# Altium footprint library 2.00-SOP、SOIC封装.PcbLib: 70 footprints (part 5 of 5)
Each footprint in its own frame and in the unit in brackets; x right, y up, seen from the top. Pads: shape width x height; smd on the part's side, far side on the other; paste and mask are expansions set on the pad; w line width, h text height; cw(c..) or ccw(c..) is an arc to the next point about the centre after c.
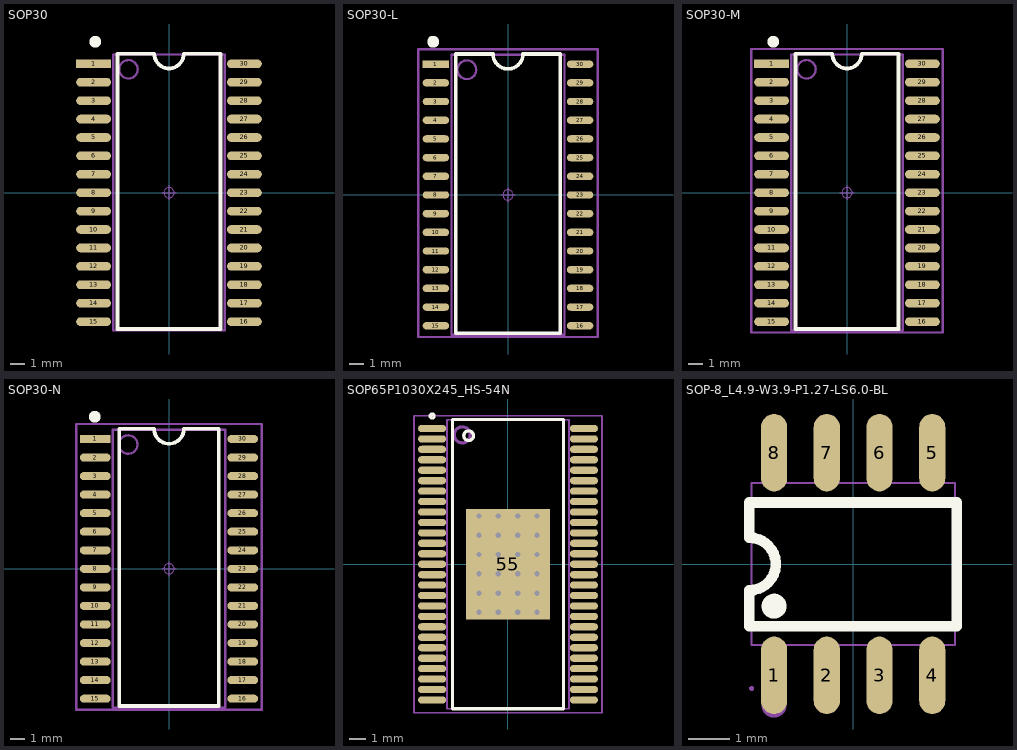
[diagram p4: the footprints below, top view; thin cyan lines are the x and y axes]

## SOP30 [mm] "淘宝ID:黄晶宝石"
pads (30):
  rect 2.4x0.6 smd: 1(-5.2,8.89)
  oval 2.4x0.6 smd: 2(-5.2,7.62) 3(-5.2,6.35) 4(-5.2,5.08) 5(-5.2,3.81) 6(-5.2,2.54) 7(-5.2,1.27) 8(-5.2,0) 9(-5.2,-1.27) 10(-5.2,-2.54) 11(-5.2,-3.81) 12(-5.2,-5.08) 13(-5.2,-6.35) 14(-5.2,-7.62) 15(-5.2,-8.89) 16(5.2,-8.89) 17(5.2,-7.62) 18(5.2,-6.35) 19(5.2,-5.08) 20(5.2,-3.81) 21(5.2,-2.54) 22(5.2,-1.27) 23(5.2,0) 24(5.2,1.27) 25(5.2,2.54) 26(5.2,3.81) 27(5.2,5.08) 28(5.2,6.35) 29(5.2,7.62) 30(5.2,8.89)
Top Overlay:
  circle w0.5: c-5.08,10.414 r0.155
  lines w0.254: -3.556,-9.398 3.556,-9.398 3.556,9.585 1.016,9.585 cw(c0,9.585) -1.016,9.585 -3.556,9.585 -3.556,-9.398
Mechanical 13:
  circle w0.15: c-2.794,8.509 r0.635
  lines w0.15: -3.85,-9.5 -3.85,9.525 3.85,9.525 3.85,-9.5 -3.85,-9.5
Mechanical 15:
  circle w0.05: c0,0 r0.35
  lines w0.05: -0.5,0 0.5,0 ; 0,-0.5 0,0.5
3D body "SOP30.STEP": height 2.7, standoff 0, extent -5.153,-9.5 5.153,9.5

## SOP30-L [mm] "19*10.3*2.6mm（长宽高）  淘宝ID:黄晶宝石"
pads (30):
  rect 1.8x0.5 smd: 1(-4.9,8.89)
  oval 1.8x0.5 smd: 2(-4.9,7.62) 3(-4.9,6.35) 4(-4.9,5.08) 5(-4.9,3.81) 6(-4.9,2.54) 7(-4.9,1.27) 8(-4.9,0) 9(-4.9,-1.27) 10(-4.9,-2.54) 11(-4.9,-3.81) 12(-4.9,-5.08) 13(-4.9,-6.35) 14(-4.9,-7.62) 15(-4.9,-8.89) 16(4.9,-8.89) 17(4.9,-7.62) 18(4.9,-6.35) 19(4.9,-5.08) 20(4.9,-3.81) 21(4.9,-2.54) 22(4.9,-1.27) 23(4.9,0) 24(4.9,1.27) 25(4.9,2.54) 26(4.9,3.81) 27(4.9,5.08) 28(4.9,6.35) 29(4.9,7.62) 30(4.9,8.89)
Top Overlay:
  circle w0.5: c-5.08,10.414 r0.155
  lines w0.254: -3.556,-9.398 3.556,-9.398 3.556,9.585 1.016,9.585 cw(c0,9.585) -1.016,9.585 -3.556,9.585 -3.556,-9.398
Mechanical 13:
  circle w0.15: c-2.794,8.509 r0.635
  lines w0.15: -3.85,-9.5 -3.85,9.525 3.85,9.525 3.85,-9.5 -3.85,-9.5
Mechanical 15:
  circle w0.05: c0,0 r0.35
  lines w0.05: -0.5,0 0.5,0 ; 0,-0.5 0,0.5
  lines w0.15: -6.096,-9.652 -6.096,9.906 6.096,9.906 6.096,-9.652 -6.096,-9.652
3D body "SOP30.STEP": height 2.7, standoff 0, extent -5.153,-9.5 5.153,9.5

## SOP30-M [mm] "19*10.3*2.6mm（长宽高）  封装库来自淘宝ID：黄晶宝石"
pads (30):
  rect 2.4x0.6 smd: 1(-5.2,8.89)
  oval 2.4x0.6 smd: 2(-5.2,7.62) 3(-5.2,6.35) 4(-5.2,5.08) 5(-5.2,3.81) 6(-5.2,2.54) 7(-5.2,1.27) 8(-5.2,0) 9(-5.2,-1.27) 10(-5.2,-2.54) 11(-5.2,-3.81) 12(-5.2,-5.08) 13(-5.2,-6.35) 14(-5.2,-7.62) 15(-5.2,-8.89) 16(5.2,-8.89) 17(5.2,-7.62) 18(5.2,-6.35) 19(5.2,-5.08) 20(5.2,-3.81) 21(5.2,-2.54) 22(5.2,-1.27) 23(5.2,0) 24(5.2,1.27) 25(5.2,2.54) 26(5.2,3.81) 27(5.2,5.08) 28(5.2,6.35) 29(5.2,7.62) 30(5.2,8.89)
Top Overlay:
  circle w0.5: c-5.08,10.414 r0.155
  lines w0.254: -3.556,-9.398 3.556,-9.398 3.556,9.585 1.016,9.585 cw(c0,9.585) -1.016,9.585 -3.556,9.585 -3.556,-9.398
Mechanical 13:
  circle w0.15: c-2.794,8.509 r0.635
  lines w0.15: -3.85,-9.5 -3.85,9.525 3.85,9.525 3.85,-9.5 -3.85,-9.5
Mechanical 15:
  circle w0.05: c0,0 r0.35
  lines w0.05: -0.5,0 0.5,0 ; 0,-0.5 0,0.5
  lines w0.15: -6.604,-9.652 6.604,-9.652 6.604,-8.89 6.604,9.906 -6.604,9.906 -6.604,-9.652
3D body "SOP30.STEP": height 2.7, standoff 0, extent -5.153,-9.5 5.153,9.5

## SOP30-N [mm] "19*10.3*2.6mm（长宽高） 封装库来自淘宝ID：黄晶宝石"
pads (30):
  rect 2.1x0.55 smd: 1(-5.05,8.89)
  oval 2.1x0.55 smd: 2(-5.05,7.62) 3(-5.05,6.35) 4(-5.05,5.08) 5(-5.05,3.81) 6(-5.05,2.54) 7(-5.05,1.27) 8(-5.05,0) 9(-5.05,-1.27) 10(-5.05,-2.54) 11(-5.05,-3.81) 12(-5.05,-5.08) 13(-5.05,-6.35) 14(-5.05,-7.62) 15(-5.05,-8.89) 16(5.05,-8.89) 17(5.05,-7.62) 18(5.05,-6.35) 19(5.05,-5.08) 20(5.05,-3.81) 21(5.05,-2.54) 22(5.05,-1.27) 23(5.05,0) 24(5.05,1.27) 25(5.05,2.54) 26(5.05,3.81) 27(5.05,5.08) 28(5.05,6.35) 29(5.05,7.62) 30(5.05,8.89)
Top Overlay:
  circle w0.5: c-5.08,10.414 r0.155
  lines w0.254: -3.4,-9.398 3.4,-9.398 3.4,9.585 1.016,9.585 cw(c0,9.585) -1.016,9.585 -3.4,9.585 -3.4,-9.398
Mechanical 13:
  circle w0.15: c-2.794,8.509 r0.635
  lines w0.15: -3.85,-9.5 3.85,-9.5 3.85,9.525 -3.85,9.525 -3.85,-9.5
Mechanical 15:
  circle w0.05: c0,0 r0.35
  lines w0.05: -0.5,0 0.5,0 ; 0,-0.5 0,0.5
  lines w0.15: -6.35,-9.652 -6.35,9.906 6.35,9.906 6.35,-9.652 -6.35,-9.652
3D body "SOP30.STEP": height 2.7, standoff 0, extent -5.153,-9.5 5.153,9.5

## SOP65P1030X245_HS-54N [mm] "SOP, 54-Leads, Body 18.0x7.6mm (max), Pitch 0.65mm, IPC Medium Density"
height 2.45
pads (55):
  oval 1.75x0.45 smd: 1(-4.725,8.45) 2(-4.725,7.8) 3(-4.725,7.15) 4(-4.725,6.5) 5(-4.725,5.85) 6(-4.725,5.2) 7(-4.725,4.55) 8(-4.725,3.9) 9(-4.725,3.25) 10(-4.725,2.6) 11(-4.725,1.95) 12(-4.725,1.3) 13(-4.725,0.65) 14(-4.725,0) 15(-4.725,-0.65) 16(-4.725,-1.3) 17(-4.725,-1.95) 18(-4.725,-2.6) 19(-4.725,-3.25) 20(-4.725,-3.9) 21(-4.725,-4.55) 22(-4.725,-5.2) 23(-4.725,-5.85) 24(-4.725,-6.5) 25(-4.725,-7.15) 26(-4.725,-7.8) 27(-4.725,-8.45) 28(4.725,-8.45) 29(4.725,-7.8) 30(4.725,-7.15) 31(4.725,-6.5) 32(4.725,-5.85) 33(4.725,-5.2) 34(4.725,-4.55) 35(4.725,-3.9) 36(4.725,-3.25) 37(4.725,-2.6) 38(4.725,-1.95) 39(4.725,-1.3) 40(4.725,-0.65) 41(4.725,0) 42(4.725,0.65) 43(4.725,1.3) 44(4.725,1.95) 45(4.725,2.6) 46(4.725,3.25) 47(4.725,3.9) 48(4.725,4.55) 49(4.725,5.2) 50(4.725,5.85) 51(4.725,6.5) 52(4.725,7.15) 53(4.725,7.8) 54(4.725,8.45)
  rect 5.2x6.9 smd: 55(0,0)
via 1.8,-3 diameter 0.66 hole 0.33
via 0.6,-3 diameter 0.66 hole 0.33
via -0.6,-3 diameter 0.66 hole 0.33
via -1.8,-3 diameter 0.66 hole 0.33
via 1.8,-1.8 diameter 0.66 hole 0.33
via 0.6,-1.8 diameter 0.66 hole 0.33
via -0.6,-1.8 diameter 0.66 hole 0.33
via -1.8,-1.8 diameter 0.66 hole 0.33
via 1.8,-0.6 diameter 0.66 hole 0.33
via 0.6,-0.6 diameter 0.66 hole 0.33
via -0.6,-0.6 diameter 0.66 hole 0.33
via -1.8,-0.6 diameter 0.66 hole 0.33
via 1.8,0.6 diameter 0.66 hole 0.33
via 0.6,0.6 diameter 0.66 hole 0.33
via -0.6,0.6 diameter 0.66 hole 0.33
via -1.8,0.6 diameter 0.66 hole 0.33
via 1.8,1.8 diameter 0.66 hole 0.33
via 0.6,1.8 diameter 0.66 hole 0.33
via -0.6,1.8 diameter 0.66 hole 0.33
via -1.8,1.8 diameter 0.66 hole 0.33
via 1.8,3 diameter 0.66 hole 0.33
via 0.6,3 diameter 0.66 hole 0.33
via -0.6,3 diameter 0.66 hole 0.33
via -1.8,3 diameter 0.66 hole 0.33
Top Overlay:
  circle w0.2: c-2.45,8 r0.3
  circle w0.2: c-4.725,9.225 r0.125
  lines w0.2: -3.45,-9 3.45,-9 3.45,9 -3.45,9 -3.45,-9
Mechanical 13:
  circle w0.2: c-2.85,8.05 r0.5
  lines w0.1: -3.8,-9 3.8,-9 3.8,9 -3.8,9 -3.8,-9
Mechanical 15:
  lines w0.1: -0.5,0 0.5,0 ; 0,-0.5 0,0.5 ; -5.85,-9.25 5.85,-9.25 5.85,9.25 -5.85,9.25 -5.85,-9.25
3D body: height 2.45, standoff 0.1, extent -3.8,-9 3.8,9

## SOP-8_L4.9-W3.9-P1.27-LS6.0-BL [mm]
pads (8):
  oval 0.63x1.865 smd: 1(-1.905,-2.682) 2(-0.635,-2.682) 3(0.635,-2.682) 4(1.905,-2.682) 5(1.905,2.682) 6(0.635,2.682) 7(-0.635,2.682) 8(-1.905,2.682)
Top Overlay:
  circle w0.3: c-1.905,-1.016 r0.15
  lines w0.254: -2.5,-1.498 2.5,-1.498 2.5,1.482 -2.5,1.482 -2.499,0.635 cw(c-2.5,0) -2.5,-0.635 -2.5,-1.498
Mechanical 6:
  circle w0.3: c-1.905,-3.4 r0.15
Mechanical 15:
  region: 2.115,-2.232 1.695,-2.232 1.695,-1.942 2.115,-1.942
  region: 0.845,-2.232 0.425,-2.232 0.425,-1.942 0.845,-1.942
  region: -0.425,-2.232 -0.845,-2.232 -0.845,-1.942 -0.425,-1.942
  region: -1.695,-2.232 -2.115,-2.232 -2.115,-1.942 -1.695,-1.942
  region: -2.115,2.232 -1.695,2.232 -1.695,1.942 -2.115,1.942
  region: -0.845,2.232 -0.425,2.232 -0.425,1.942 -0.845,1.942
  region: 0.425,2.232 0.845,2.232 0.845,1.942 0.425,1.942
  region: 1.695,2.232 2.115,2.232 2.115,1.942 1.695,1.942
  region: -2.115,-3 -2.115,-2.165 -1.695,-2.165 -1.695,-3
  region: -0.845,-3 -0.845,-2.165 -0.425,-2.165 -0.425,-3
  region: 0.425,-3 0.425,-2.165 0.845,-2.165 0.845,-3
  region: 1.695,-3 1.695,-2.165 2.115,-2.165 2.115,-3
  region: -2.115,2.165 -2.115,3 -1.695,3 -1.695,2.165
  region: -0.845,2.165 -0.845,3 -0.425,3 -0.425,2.165
  region: 0.425,2.165 0.425,3 0.845,3 0.845,2.165
  region: 1.695,2.165 1.695,3 2.115,3 2.115,2.165
  region: -2.39,-3 -2.391,-2.976 -2.426,-2.942 -2.474,-2.942 -2.509,-2.976 -2.51,-3 -2.509,-3.024 -2.474,-3.058 -2.426,-3.058 -2.391,-3.024 -2.39,-3
  lines w0.051: -2.45,-1.95 2.45,-1.95 2.45,1.95 -2.45,1.95 -2.45,-1.95
3D body "cMKx-U2-SOP-8_L4.9-W3.9-P1.27-LS6.0-BL.STEP": height 1.5, standoff 0, extent -2.45,-3 2.45,3